# Altium footprint library LED1206.PcbLib: 1 footprints
Each footprint in its own frame and in the unit in brackets; x right, y up, seen from the top. Pads: shape width x height; smd on the part's side, far side on the other; paste and mask are expansions set on the pad; w line width, h text height; cw(c..) or ccw(c..) is an arc to the next point about the centre after c.
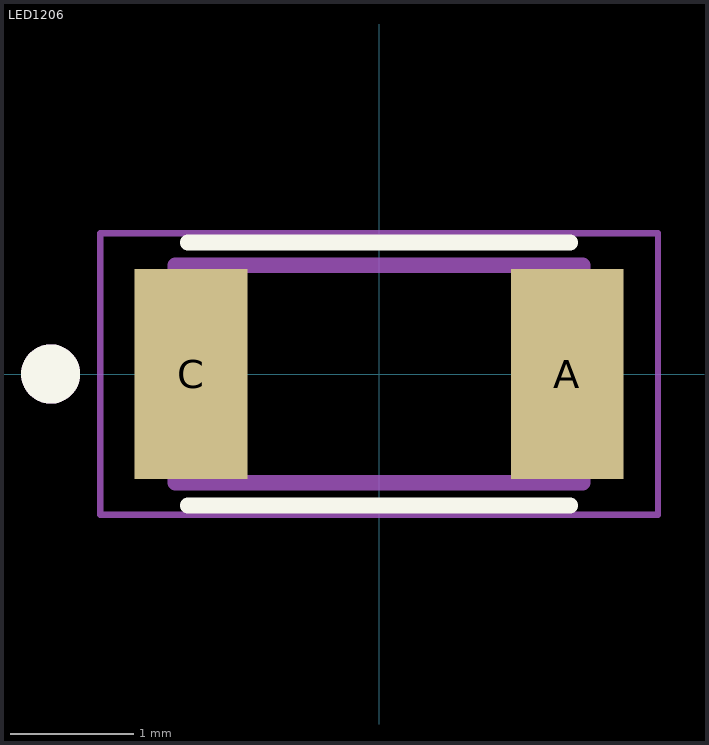
[diagram p0: the footprint, top view; thin cyan lines are the x and y axes]

## LED1206 [mil] "LEDC3115X65N"
pads (2):
  rect 36x67 smd: A(60,0) C(-60,0)
Top Overlay:
  circle w9.45: c-104.8,0 r4.72
  lines w5: -61.02,-41.93 61.02,-41.93 ; -61.02,41.93 61.02,41.93
Mechanical 13:
  circle w9.45: c-104.8,0 r4.72
  lines w5: -64.96,-34.65 -64.96,34.65 64.96,34.65 64.96,-34.65 -64.96,-34.65
Mechanical 15:
  lines w1.97: -88.98,-44.88 -88.98,44.88 88.98,44.88 88.98,-44.88 -88.98,-44.88
3D body "LED1206_RED.STEP": height 43.31, standoff 0, extent -63.39,-31.5 63.39,31.5